# Altium schematic symbol library Resistor_length6.3_pitch7.62.SchLib: 1 symbol
Pins are listed as number, name and electrical type; pins without a type are passive.

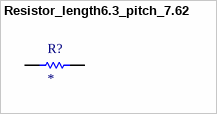
[diagram p0: symbol Resistor_length6.3_pitch_7.62]

## Resistor_length6.3_pitch_7.62
designator R?
footprint resistor_length6.3_pitch7.62
pins: 1, 2